# Altium schematic symbol library Schlib1.SchLib: 1 symbol
Pins are listed as number, name and electrical type; pins without a type are passive.

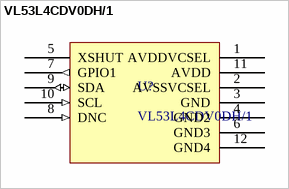
[diagram p0: symbol VL53L4CDV0DH/1]

## VL53L4CDV0DH/1
designator U?
Time of Flight Sensor, VL53L4CD Series, 1.3 m, 2.6 V to , 3.5 V, LGA, 12 Pins; Manufacturer: STMicroelectronics; Current Rating: 24mA; Max Supply Voltage: 3.5V; Min Supply Voltage: 2.6V; Sensing Distance: 1.2m; Supplier: DigiKey; Supplier Part Number: 497-VL53L4CDV0DH/1CT-ND; Manufacturer Part Number: VL53L4CDV0DH/1; RoHS: Compliant; Category: Position Sensors; Stock: 38987; Pricing: 1=4.4, 5=3.942, 10=3.769, 25=3.564, 50=3.4238, 100=3.2953, 500=3.03682, 1000=2.94052 (USD); China RoHS: Compliant; Country of Origin: Mainland China; Export Control Classification Number (ECCN) Code: EAR99; Height: 1mm; Introduction Date: 2021-11-02; Length: 4.4mm; Lifecycle Status: Production; Max Operating Temperature: 85°C; Min Operating Temperature: -30°C; Mounting Technology: Surface Mount; Pins: 12; REACH SVHC: Unaffected; Termination: Solder; Supplier 1: DigiKey; Supplier Part Number 1: 497-VL53L4CDV0DH/1CT-ND
pins: 1 AVDDVCSEL (power), 2 AVSSVCSEL (power), 3 GND (power), 4 GND2 (power), 5 XSHUT, 6 GND3 (power), 7 GPIO1 (out), 8 DNC (in), 9 SDA (io), 10 SCL (in), 11 AVDD (power), 12 GND4 (power)